# Altium schematic symbol library Clema_SJ.SchLib: 1 symbol
Pins are listed as number, name and electrical type; pins without a type are passive.

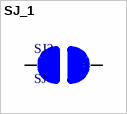
[diagram p0: symbol SJ_1]

## SJ_1
designator SJ?, comment SJ
footprint SJ_1
pins: 1, 2